# Altium footprint library 调理电路板.PcbLib: 25 footprints (part 1 of 2)
Each footprint in its own frame and in the unit in brackets; x right, y up, seen from the top. Pads: shape width x height; smd on the part's side, far side on the other; paste and mask are expansions set on the pad; w line width, h text height; cw(c..) or ccw(c..) is an arc to the next point about the centre after c.
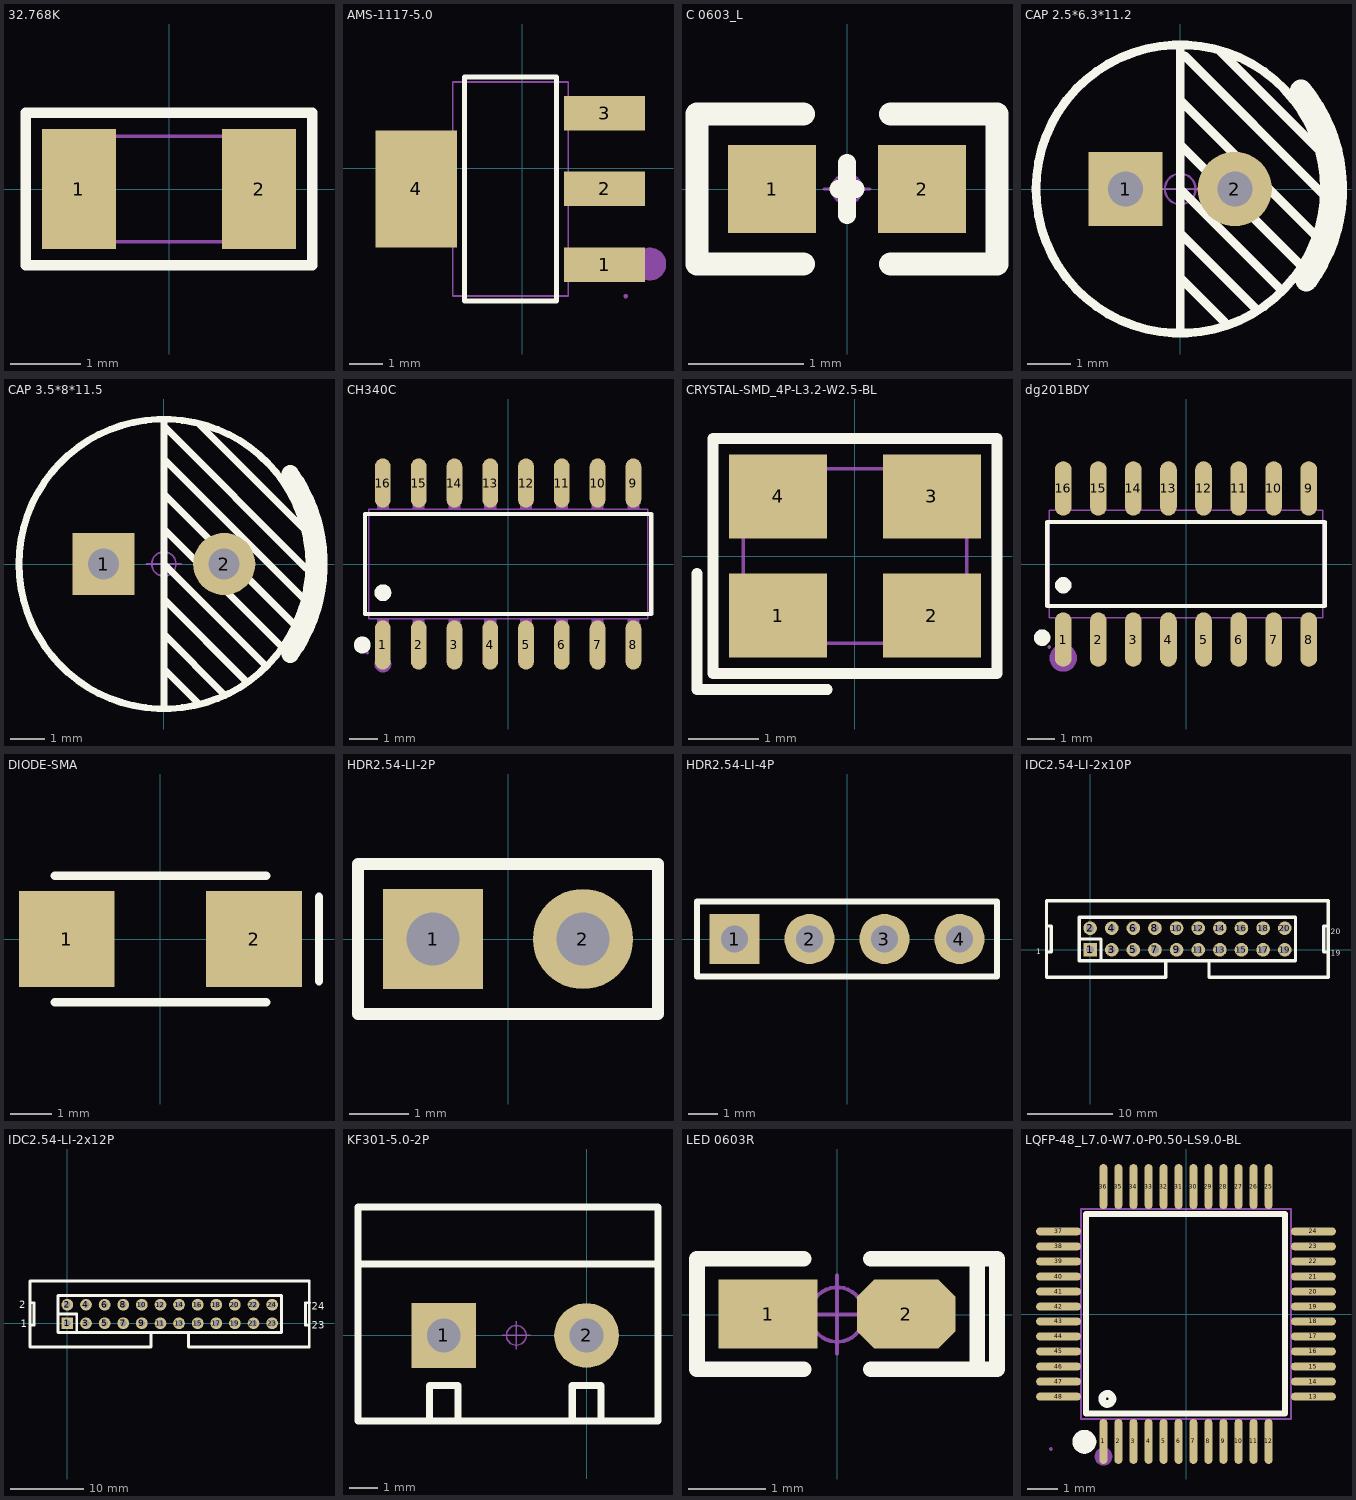
[diagram p0: the footprints below, top view; thin cyan lines are the x and y axes]

## 32.768K [mil]
pads (2):
  rect 41.3x66.9 smd paste+2 mask+4: 1(-50.2,0) 2(50.2,0)
Top Overlay:
  lines w6: -79.9,-42.5 79.9,-42.5 79.9,42.5 -79.9,42.5 -79.9,-42.5
Mechanical 16:
  region: -60.6,-29.5 -60.6,-30.5 -62,-31.9 -64,-31.9 -65.3,-30.5 -65.3,-29.5 -65.3,-28.6 -64,-27.2 -62,-27.2 -60.6,-28.6
  region: 33.5,25.6 57.1,25.6 57.1,-25.6 33.5,-25.6
  region: -57.1,25.6 -33.5,25.6 -33.5,-25.6 -57.1,-25.6
  lines w2: -63,-29.5 63,-29.5 63,29.5 -63,29.5 -63,-29.5

## AMS-1117-5.0 [mil]
pads (4):
  rect 97x41.3 smd paste+2 mask+4: 1(98.5,-115.4) 2(98.5,-24.8) 3(98.5,65.7)
  rect 97x139.4 smd paste+2 mask+4: 4(-126.5,-24.8)
Top Overlay:
  lines w6: -69,-158.7 41,-158.7 41,109.1 -69,109.1 -69,-158.7
Mechanical 16:
  region: -101,-83.9 -101,34.2 -82.5,34.2 -82.5,-83.9
  region: 54.5,-129.2 54.5,-101.6 98.6,-101.6 98.6,-129.2
  region: 54.5,-38.6 54.5,-11.1 98.6,-11.1 98.6,-38.6
  region: 54.5,51.9 54.5,79.5 98.6,79.5 98.6,51.9
  region: -151.8,-83.9 -151.8,34.2 -100.6,34.2 -100.6,-83.9
  region: 98.2,-129.2 98.2,-101.6 123.8,-101.6 123.8,-129.2
  region: 98.2,-38.6 98.2,-11.1 123.8,-11.1 123.8,-38.6
  region: 98.2,51.9 98.2,79.5 123.8,79.5 123.8,51.9
  region: 126.2,-152.8 126.2,-153.8 124.8,-155.2 122.8,-155.2 121.5,-153.8 121.5,-152.8 121.5,-151.8 122.8,-150.4 124.8,-150.4 126.2,-151.8
  lines w2: -82.9,-152.8 -82.9,103.1 54.9,103.1 54.9,-152.8 -82.9,-152.8
  lines w19.7: 142.7,-114.5 ccw(c152.5,-114.5) 162.3,-114.5 ccw(c152.5,-114.5) 142.7,-114.5

## C 0603_L [mil]
pads (2):
  rect 30x30 smd: 1(-25.6,0) 2(25.6,0)
Top Overlay:
  lines w6: -3,0 0,0 3,0 ; 0,-9 0,9
  lines w8: -15,-25.6 -51.2,-25.6 -51.2,25.6 -15,25.6 ; 15,-25.6 51.2,-25.6 51.2,25.6 15,25.6
Mechanical 16:
  lines w1: -7.9,0 7.8,0 ; 0,-7.9 0,7.9 ; -5,0 ccw(c0,0) 5,0 ccw(c0,0) -5,0

## CAP 2.5*6.3*11.2 [mil]
pads (2):
  rect 66.9x66.9 hole 31.5: 1(-49.2,0)
  round 66.9 hole 31.5: 2(49.2,0)
Top Overlay:
  lines w7.9: 0,-127 0,129 ; 0,-80 40,-120 ; 0,-40 68,-108 ; 0,0 90.5,-90.5 ; 0,40 109,-69 113,-69 ; 0,80 122,-42 ; 0,120 4,120 130,-6 ; 36.5,123.5 123,37 126,37 ; -129.9,0 ccw(c0,0) 129.9,0 ccw(c0,0) -129.9,0
  lines w19.8: 108.6,88.9 114.8,80.7 120.4,72.1 125.4,63.1 129.6,53.8 133.2,44.2 136.1,34.4 138.2,24.4 139.6,14.2 140.3,4 140.2,-6.3 139.4,-16.5 137.8,-26.6 135.5,-36.6 132.5,-46.4 128.7,-55.9 124.3,-65.2 119.2,-74.1 113.5,-82.6
Mechanical 16:
  lines w2: -19.7,0 19.7,0 ; 0,-19.7 0,19.7 ; -13.8,0 ccw(c0,0) 13.8,0 ccw(c0,0) -13.8,0

## CAP 3.5*8*11.5 [mil]
pads (2):
  rect 70.9x70.9 hole 35.4: 1(-68.9,0)
  round 70.9 hole 35.4: 2(68.9,0)
Top Overlay:
  lines w7.9: 0,-165 0,157.5 ; 0,-120 40,-160 ; 0,-80 70,-150 ; 0,-40 95,-135 ; 0,0 115,-115 ; 0,40 135,-95 ; 0,80 150,-70 ; 0,120 160,-40 ; 0,165 0,157.5 ; 40,160 165,35 ; 165,-5 162.5,-5 0,157.5 ; -165.4,0 ccw(c0,0) 165.4,0 ccw(c0,0) -165.4,0
  lines w19.8: 144.2,-103 150.6,-93.4 156.4,-83.3 161.5,-73 165.9,-62.3 169.6,-51.3 172.6,-40.1 174.8,-28.8 176.4,-17.3 177.1,-5.8 177.1,5.8 176.4,17.3 174.8,28.8 172.6,40.1 169.6,51.3 165.9,62.3 161.5,73 156.4,83.3 150.6,93.4 144.2,103
Mechanical 16:
  lines w2: -19.7,0 19.7,0 ; 0,-19.7 0,19.7 ; -13.8,0 ccw(c0,0) 13.8,0 ccw(c0,0) -13.8,0

## CH340C [mil]
pads (16):
  oval 22x68.7 smd paste+2 mask+4: 1(-175,-113.1) 2(-125,-113.1) 3(-75,-113.1) 4(-25,-113.1) 5(25,-113.1) 6(75,-113.1) 7(125,-113.1) 8(175,-113.1) 9(175,113.1) 10(125,113.1) 11(75,113.1) 12(25,113.1) 13(-25,113.1) 14(-75,113.1) 15(-125,113.1) 16(-175,113.1)
Top Overlay:
  lines w6: -199.8,-69.7 -199.8,69.7 199.9,69.7 199.9,-69.7 -199.8,-69.7
  lines w11.8: -209.7,-113.1 ccw(c-203.8,-113.1) -197.9,-113.1 ccw(c-203.8,-113.1) -209.7,-113.1 ; -180.9,-40.1 ccw(c-175,-40.1) -169.1,-40.1 ccw(c-175,-40.1) -180.9,-40.1
Mechanical 16:
  drawing of 39 lines, arcs and shapes, not listed

## CRYSTAL-SMD_4P-L3.2-W2.5-BL [mil]
pads (4):
  rect 55.1x47.2 smd: 1(-43.3,-33.5) 2(43.3,-33.5) 3(43.3,33.5) 4(-43.3,33.5)
Top Overlay:
  lines w6: -88.9,-9.8 -88.9,-75.1 -15.7,-75.1 ; -79.9,-66.1 79.9,-66.1 79.9,66.1 -79.9,66.1 -79.9,-66.1
Mechanical 16:
  region: -59.1,-13.8 -23.6,-13.8 -23.6,-45.3 -59.1,-45.3
  region: 23.6,-13.8 59.1,-13.8 59.1,-45.3 23.6,-45.3
  region: 23.6,45.3 59.1,45.3 59.1,13.8 23.6,13.8
  region: -59.1,45.3 -23.6,45.3 -23.6,13.8 -59.1,13.8
  region: -60.6,-49.2 -61,-50.5 -62,-51.4 -63.3,-51.5 -64.5,-51 -65.3,-49.9 -65.3,-48.5 -64.5,-47.4 -63.3,-46.9 -62,-47.1 -61,-47.9
  lines w2: -63,-49.2 63,-49.2 63,49.2 -63,49.2 -63,-49.2
  lines w10: -55,-35 -54.6,-33.1 -53.5,-31.5 -51.9,-30.4 -50,-30 -48.1,-30.4 -46.5,-31.5 -45.4,-33.1 -45,-35 -45.4,-36.9 -46.5,-38.5 -48.1,-39.6 -50,-40 -51.9,-39.6 -53.5,-38.5 -54.6,-36.9 -55,-35

## dg201BDY [mil]
pads (16):
  oval 23.7x77.6 smd paste+2 mask+4: 1(-175,-107.7) 2(-125,-107.7) 3(-75,-107.7) 4(-25,-107.7) 5(25,-107.7) 6(75,-107.7) 7(125,-107.7) 8(175,-107.7) 9(175,107.7) 10(125,107.7) 11(75,107.7) 12(25,107.7) 13(-25,107.7) 14(-75,107.7) 15(-125,107.7) 16(-175,107.7)
Top Overlay:
  lines w6: -197.9,-59.9 -197.9,59.9 197.9,59.9 197.9,-59.9 -197.9,-59.9
  lines w11.8: -210.9,-105 ccw(c-205,-105) -199.1,-105 ccw(c-205,-105) -210.9,-105 ; -180.9,-30.3 ccw(c-175,-30.3) -169.1,-30.3 ccw(c-175,-30.3) -180.9,-30.3
Mechanical 16:
  drawing of 39 lines, arcs and shapes, not listed

## DIODE-SMA [mil]
pads (2):
  rect 90.6x90.6 smd: 1(-88.6,0) 2(88.6,0)
Top Overlay:
  lines w7.9: -100,-60 100,-60 ; -100,60 100,60 ; 150,-40 150,40

## HDR2.54-LI-2P [mil]
pads (2):
  rect 66.9x66.9 hole 35.4: 1(-50,0)
  round 66.9 hole 35.4: 2(50,0)
Top Overlay:
  lines w7.9: -100,-50 -100,50 100,50 100,-50 -100,-50

## HDR2.54-LI-4P [mil]
pads (4):
  rect 66.9x66.9 hole 35.4: 1(-150,0)
  round 66.9 hole 35.4: 2(-50,0) 3(50,0) 4(150,0)
Top Overlay:
  lines w7.9: -200,-50 200,-50 200,50 -200,50 -200,-50

## IDC2.54-LI-2x10P [mil]
pads (20):
  rect 63x63 hole 35.4: 1(0,0)
  round 63 hole 35.4: 2(0,100) 3(100,0) 4(100,100) 5(200,0) 6(200,100) 7(300,0) 8(300,100) 9(400,0) 10(400,100) 11(500,0) 12(500,100) 13(600,0) 14(600,100) 15(700,0) 16(700,100) 17(800,0) 18(800,100) 19(900,0) 20(900,100)
Top Overlay:
  lines w15: -201.2,-10 -180,-10 -180,110 -200,110 ; -50,50 50,50 50,-50 ; 350,-50 350,-127.2 -201.2,-127.2 -201.2,227.2 1101.2,227.2 1101.2,-127.2 550,-127.2 550,-50 ; 1100,-10 1080,-10 1080,110 1101.2,110 ; -50,-50 -50,150 950,150 950,-50 -50,-50
  text "1" at -250,-20 h25
  text "20" at 1112,72 h25
  text "19" at 1112,-28 h25
Bottom Overlay:
  lines w23.6: -41,50 925.2,50 ; 50,-32 50,140 ; 150,-32 150,140 ; 250,-32 250,140 ; 350,-32 350,140 ; 450,-32 450,140 ; 550,-32 550,140 ; 650,-32 650,140 ; 750,-32 750,140 ; 850,-32 850,140

## IDC2.54-LI-2x12P [mil]
pads (24):
  rect 63x63 hole 35.4: 1(0,0)
  round 63 hole 35.4: 2(0,100) 3(100,0) 4(100,100) 5(200,0) 6(200,100) 7(300,0) 8(300,100) 9(400,0) 10(400,100) 11(500,0) 12(500,100) 13(600,0) 14(600,100) 15(700,0) 16(700,100) 17(800,0) 18(800,100) 19(900,0) 20(900,100) 21(1000,0) 22(1000,100) 23(1100,0) 24(1100,100)
Top Overlay:
  lines w15: -201.1,-10 -180,-10 -180,110 -200,110 ; -50,50 50,50 50,-50 ; 450,-50 450,-127.2 -201.1,-127.2 -201.1,227.2 1300,227.2 1300,-127.2 650,-127.2 650,-50 ; 1149.9,150 -50,150 -50,-50 1150,-50 1150,150.1 ; 1300,-10 1280,-10 1280,110 1301.2,110
  text "2" at -260,80 h40
  text "1" at -250,-20 h40
  text "24" at 1312,72 h40
  text "23" at 1312,-28 h40
Bottom Overlay:
  lines w23.6: -41,50 1122.1,50 ; 50,-32 50,140 ; 150.1,-32 150.1,140 ; 250.1,-32 250.1,140 ; 350.1,-32 350.1,140 ; 450,-32 450,140 ; 550,-32 550,140 ; 650.1,-32 650.1,140 ; 750.1,-32 750.1,140 ; 850.1,-32 850.1,140 ; 950.1,-32 950.1,140 ; 1050.1,-32 1050.1,140

## KF301-5.0-2P [mil]
pads (2):
  rect 90.6x90.6 hole 47.2: 1(-200,0)
  round 90.6 hole 47.2: 2(0,0)
Top Overlay:
  lines w10: -320,100 100,100 ; -220,-120 -220,-70 -180,-70 -180,-120 ; -20,-120 -20,-70 20,-70 20,-120 ; -320,-120 -320,180 100,180 100,-120 -320,-120
Mechanical 16:
  lines w2: -118.1,0 -78.7,0 ; -98.4,-19.7 -98.4,19.7 ; -112.2,0 ccw(c-98.4,0) -84.6,0 ccw(c-98.4,0) -112.2,0

## LED 0603R [mil]
pads (2):
  rect 50x35 smd: 1(-35,0.3)
  oct 50x35 smd: 2(35,0.3)
Top Overlay:
  lines w8: -17,-27.7 -71,-27.7 -71,-25.7 -71,28.3 -70,28.3 -17,28.3 ; 17,-27.7 70,-27.7 ; 17,28.3 71,28.3 81,28.3 81,-27.7 71,-27.7 71,26.3
Mechanical 16:
  lines w2: -19.7,0 19.7,0 ; 0,-19.7 0,19.7 ; -13.8,0 ccw(c0,0) 13.8,0 ccw(c0,0) -13.8,0

## LQFP-48_L7.0-W7.0-P0.50-LS9.0-BL [mil]
pads (48):
  oval 10.6x59.1 smd paste+0 mask+2: 1(-108.3,-167.3) 2(-88.6,-167.3) 3(-68.9,-167.3) 4(-49.2,-167.3) 5(-29.5,-167.3) 6(-9.8,-167.3) 7(9.8,-167.3) 8(29.5,-167.3) 9(49.2,-167.3) 10(68.9,-167.3) 11(88.6,-167.3) 12(108.3,-167.3) 25(108.3,167.3) 26(88.6,167.3) 27(68.9,167.3) 28(49.2,167.3) 29(29.5,167.3) 30(9.8,167.3) 31(-9.8,167.3) 32(-29.5,167.3) 33(-49.2,167.3) 34(-68.9,167.3) 35(-88.6,167.3) 36(-108.3,167.3)
  oval 59.1x10.6 smd paste+0 mask+2: 13(167.3,-108.3) 14(167.3,-88.6) 15(167.3,-68.9) 16(167.3,-49.2) 17(167.3,-29.5) 18(167.3,-9.8) 19(167.3,9.8) 20(167.3,29.5) 21(167.3,49.2) 22(167.3,68.9) 23(167.3,88.6) 24(167.3,108.3) 37(-167.3,108.3) 38(-167.3,88.6) 39(-167.3,68.9) 40(-167.3,49.2) 41(-167.3,29.5) 42(-167.3,9.8) 43(-167.3,-9.8) 44(-167.3,-29.5) 45(-167.3,-49.2) 46(-167.3,-68.9) 47(-167.3,-88.6) 48(-167.3,-108.3)
Top Overlay:
  lines w7.9: -114,131.5 130,131.5 130,-130.5 -131,-130.5 -131,131.5 -101,131.5
  lines w10: -109.8,-112.5 -109.8,-110.3 -109.1,-108.2 -107.7,-106.5 -105.8,-105.3 -103.7,-104.7 -101.5,-104.9 -99.5,-105.8 -97.9,-107.3 -96.8,-109.2 -96.4,-111.4 -96.8,-113.6 -97.9,-115.5 -99.5,-117 -101.5,-117.9 -103.7,-118.1 -105.8,-117.6 -107.7,-116.4 -109.1,-114.6 -109.8,-112.5
  lines w15.7: -133.5,-159.8 -135.9,-160.2 -138.1,-161.4 -139.8,-163.1 -140.9,-165.3 -141.3,-167.7 -140.9,-170.2 -139.8,-172.4 -138,-174.1 -135.8,-175.2 -133.4,-175.6 -131,-175.2 -128.8,-174.1 -127.1,-172.4 -125.9,-170.2 -125.5,-167.7 -125.9,-165.3 -127,-163.1 -128.8,-161.4 -130.9,-160.2 -133.4,-159.8
Mechanical 16:
  drawing of 119 lines, arcs and shapes, not listed